# Altium footprint library WE-HCFT.PcbLib: 62 footprints (part 2 of 4)
Each footprint in its own frame and in the unit in brackets; x right, y up, seen from the top. Pads: shape width x height; smd on the part's side, far side on the other; paste and mask are expansions set on the pad; w line width, h text height; cw(c..) or ccw(c..) is an arc to the next point about the centre after c.
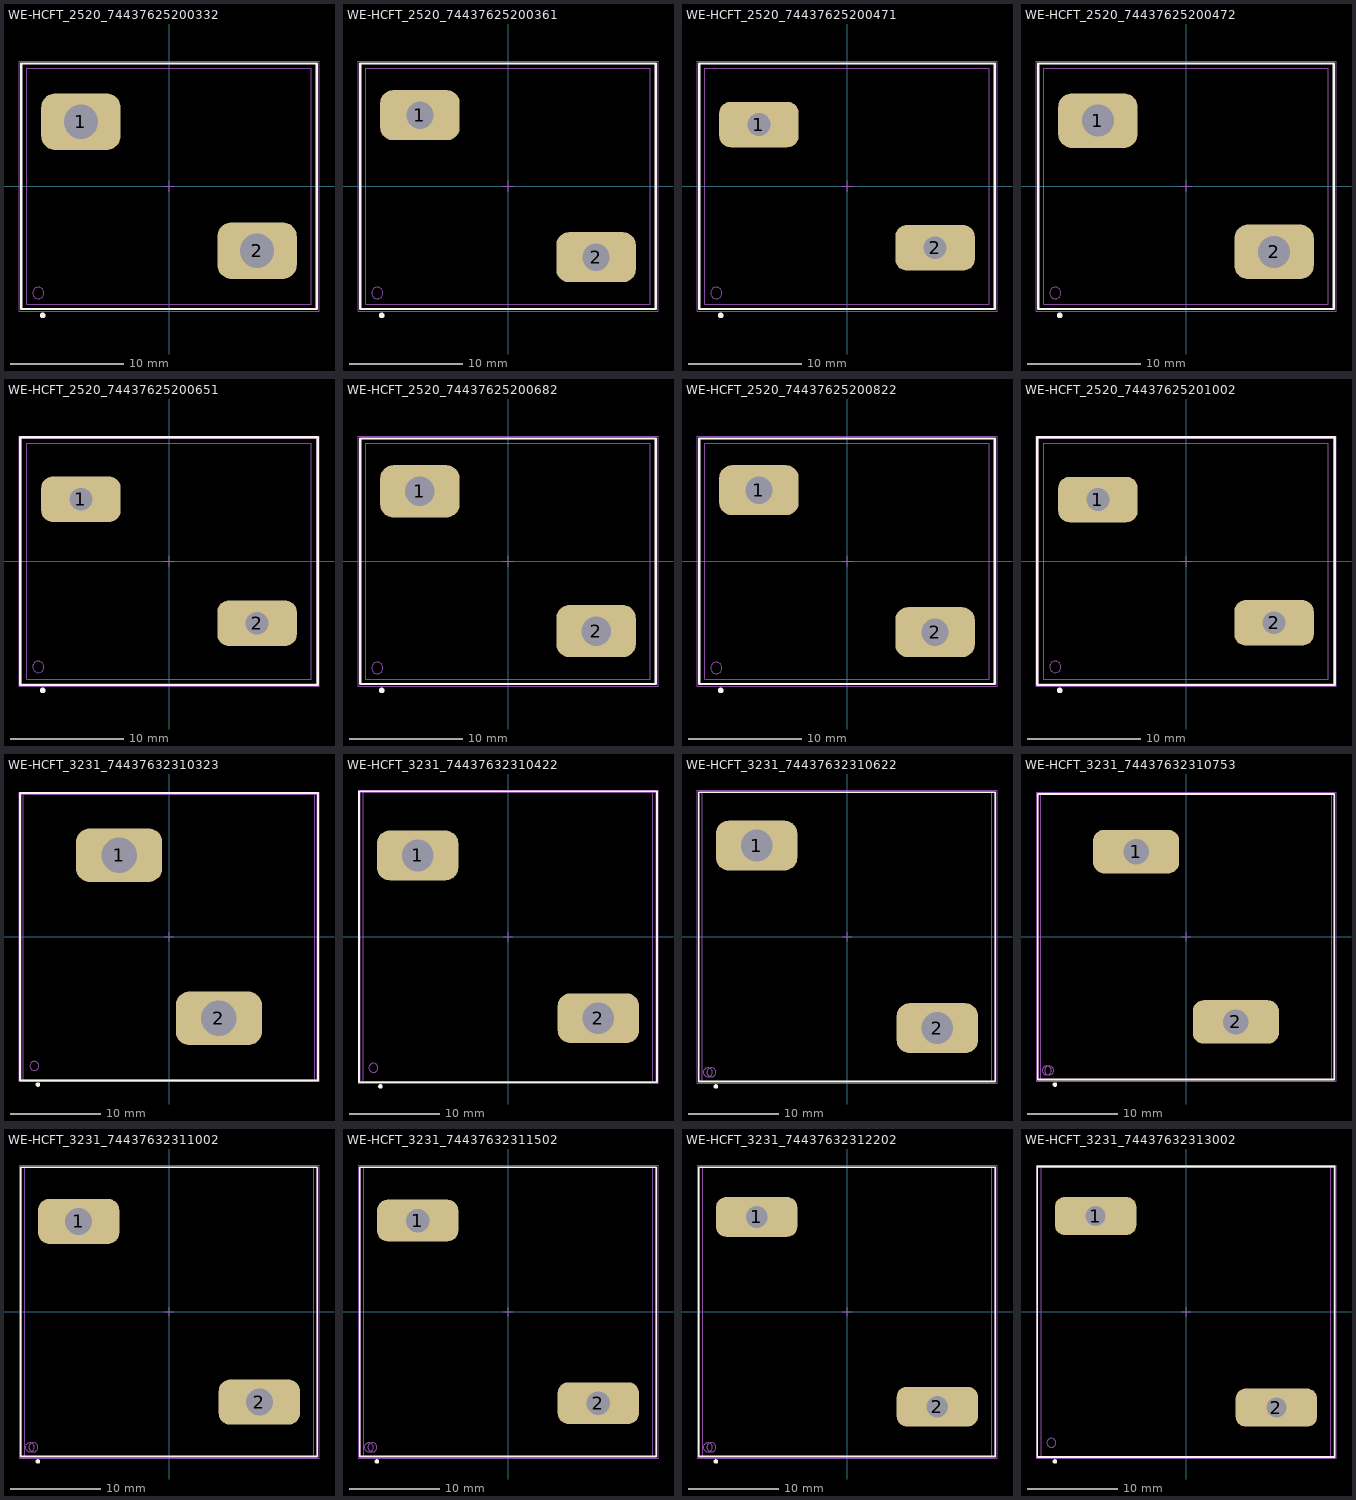
[diagram p1: the footprints below, top view; thin cyan lines are the x and y axes]

## WE-HCFT_2520_74437625200332 [mm] "THT High Current Inductor, body 25.00 x 20.80 mm"
height 21.75
pads (2):
  rrect50% 7x5 hole 3 square: 1(-7.75,5.675) 2(7.75,-5.675)
Top Overlay:
  circle w0.25: c-11.114,-11.364 r0.125
  lines w0.2: -13,-10.8 -13,10.8 13,10.8 13,-10.8 -13,-10.8
Top Assembly:
  circle w0.1: c-11.5,-9.4 r0.5
  lines w0.1: -13,-10.8 -13,10.8 13,10.8 13,-10.8 -13,-10.8
Top Designator:
  text ".Designator" at -3.647,-0.357 h1
Top 3D Body:
  circle w0.1: c-11.5,-9.4 r0.5
  lines w0.1: -12.5,-10.4 -12.5,10.4 12.5,10.4 12.5,-10.4 -12.5,-10.4
Top Courtyard:
  lines w0.05: -13.2,-11 -13.2,11 13.2,11 13.2,-11 -13.2,-11
Top Component Center:
  lines w0.1: -0.5,0 0.5,0 ; 0,-0.5 0,0.5
3D body "74437625200332.stp": height 21.9, standoff -3.85, extent -12.5,-10.4 12.5,10.4

## WE-HCFT_2520_74437625200361 [mm] "THT High Current Inductor, body 25.00 x 20.80 mm"
height 21.75
pads (2):
  rrect50% 7x4.4 hole 2.4 square: 1(-7.75,6.25) 2(7.75,-6.25)
Top Overlay:
  circle w0.25: c-11.114,-11.364 r0.125
  lines w0.2: -13,-10.8 13,-10.8 13,10.8 -13,10.8 -13,-10.8
Top Assembly:
  circle w0.1: c-11.5,-9.4 r0.5
  lines w0.1: -13,-10.8 13,-10.8 13,10.8 -13,10.8 -13,-10.8
Top Designator:
  text ".Designator" at -3.647,-0.357 h1
Top 3D Body:
  circle w0.1: c-11.5,-9.4 r0.5
  lines w0.1: -12.5,-10.4 12.5,-10.4 12.5,10.4 -12.5,10.4 -12.5,-10.4
Top Courtyard:
  lines w0.05: -13.2,-11 13.2,-11 13.2,11 -13.2,11 -13.2,-11
Top Component Center:
  lines w0.1: -0.5,0 0.5,0 ; 0,-0.5 0,0.5
3D body "74437625200361.stp": height 21.9, standoff -3.85, extent -12.5,-10.4 12.5,10.4

## WE-HCFT_2520_74437625200471 [mm] "THT High Current Inductor, body 25.00 x 20.80 mm"
height 21.75
pads (2):
  rrect50% 7x4 hole 2 square: 1(-7.75,5.425) 2(7.75,-5.425)
Top Overlay:
  circle w0.25: c-11.114,-11.364 r0.125
  lines w0.2: -13,-10.8 -13,10.8 13,10.8 13,-10.8 -13,-10.8
Top Assembly:
  circle w0.1: c-11.5,-9.4 r0.5
  lines w0.1: -13,-10.8 -13,10.8 13,10.8 13,-10.8 -13,-10.8
Top Designator:
  text ".Designator" at -3.647,-0.357 h1
Top 3D Body:
  circle w0.1: c-11.5,-9.4 r0.5
  lines w0.1: -12.5,-10.4 -12.5,10.4 12.5,10.4 12.5,-10.4 -12.5,-10.4
Top Courtyard:
  lines w0.05: -13.2,-11 -13.2,11 13.2,11 13.2,-11 -13.2,-11
Top Component Center:
  lines w0.1: -0.5,0 0.5,0 ; 0,-0.5 0,0.5
3D body "74437625200471.stp": height 21.9, standoff -3.85, extent -12.5,-10.4 12.5,10.4

## WE-HCFT_2520_74437625200472 [mm] "THT High Current Inductor, body 25.00 x 20.80 mm"
height 21.75
pads (2):
  rrect50% 7x4.8 hole 2.8 square: 1(-7.75,5.775) 2(7.75,-5.775)
Top Overlay:
  circle w0.25: c-11.114,-11.364 r0.125
  lines w0.2: -13,-10.8 13,-10.8 13,10.8 -13,10.8 -13,-10.8
Top Assembly:
  circle w0.1: c-11.5,-9.4 r0.5
  lines w0.1: -13,-10.8 13,-10.8 13,10.8 -13,10.8 -13,-10.8
Top Designator:
  text ".Designator" at -3.647,-0.357 h1
Top 3D Body:
  circle w0.1: c-11.5,-9.4 r0.5
  lines w0.1: -12.5,-10.4 12.5,-10.4 12.5,10.4 -12.5,10.4 -12.5,-10.4
Top Courtyard:
  lines w0.05: -13.2,-11 13.2,-11 13.2,11 -13.2,11 -13.2,-11
Top Component Center:
  lines w0.1: -0.5,0 0.5,0 ; 0,-0.5 0,0.5
3D body "74437625200472.stp": height 21.9, standoff -3.85, extent -12.5,-10.4 12.5,10.4

## WE-HCFT_2520_74437625200651 [mm] "THT High Current Inductor, body 25.00 x 20.80 mm"
height 21.75
pads (2):
  rrect50% 7x4 hole 2 square: 1(-7.75,5.45) 2(7.75,-5.45)
Top Overlay:
  circle w0.25: c-11.114,-11.364 r0.125
  lines w0.2: -13.1,-10.9 -13.1,10.9 13.1,10.9 13.1,-10.9 -13.1,-10.9
Top Assembly:
  circle w0.1: c-11.5,-9.3 r0.5
  lines w0.1: -13,-10.8 -13,10.8 13,10.8 13,-10.8 -13,-10.8
Top Designator:
  text ".Designator" at -3.647,-0.357 h1
Top 3D Body:
  lines w0.1: -12.5,-10.4 12.5,-10.4 12.5,10.4 -12.5,10.4 -12.5,-10.4
Top Courtyard:
  lines w0.05: -13.2,-11 13.2,-11 13.2,11 -13.2,11 -13.2,-11
Top Component Center:
  lines w0.1: -0.5,0 0.5,0 ; 0,-0.5 0,0.5
3D body "74437625200651.stp": height 21.9, standoff -3.85, extent -12.5,-10.4 12.5,10.4

## WE-HCFT_2520_74437625200682 [mm] "THT High Current Inductor, body 25.00 x 20.80 mm"
height 21.75
pads (2):
  rrect50% 7x4.6 hole 2.6 square: 1(-7.75,6.15) 2(7.75,-6.15)
Top Overlay:
  circle w0.25: c-11.114,-11.364 r0.125
  lines w0.2: -13,-10.8 13,-10.8 13,10.8 -13,10.8 -13,-10.8
Top Assembly:
  circle w0.1: c-11.5,-9.4 r0.5
  lines w0.1: -13,-10.8 13,-10.8 13,10.8 -13,10.8 -13,-10.8
Top Designator:
  text ".Designator" at -3.647,-0.357 h1
Top 3D Body:
  circle w0.1: c-11.5,-9.4 r0.5
  lines w0.1: -12.5,-10.4 12.5,-10.4 12.5,10.4 -12.5,10.4 -12.5,-10.4
Top Courtyard:
  lines w0.05: -13.2,-11 13.2,-11 13.2,11 -13.2,11 -13.2,-11
Top Component Center:
  lines w0.1: -0.5,0 0.5,0 ; 0,-0.5 0,0.5
3D body "74437625200682.stp": height 21.9, standoff -3.85, extent -12.5,-10.4 12.5,10.4

## WE-HCFT_2520_74437625200822 [mm] "THT High Current Inductor, body 25.00 x 20.80 mm"
height 21.75
pads (2):
  rrect50% 7x4.4 hole 2.4 square: 1(-7.75,6.25) 2(7.75,-6.25)
Top Overlay:
  circle w0.25: c-11.114,-11.364 r0.125
  lines w0.2: -13,-10.8 -13,10.8 13,10.8 13,-10.8 -13,-10.8
Top Assembly:
  circle w0.1: c-11.5,-9.4 r0.5
  lines w0.1: -13,-10.8 -13,10.8 13,10.8 13,-10.8 -13,-10.8
Top Designator:
  text ".Designator" at -3.647,-0.357 h1
Top 3D Body:
  circle w0.1: c-11.5,-9.4 r0.5
  lines w0.1: -12.5,-10.4 -12.5,10.4 12.5,10.4 12.5,-10.4 -12.5,-10.4
Top Courtyard:
  lines w0.05: -13.2,-11 -13.2,11 13.2,11 13.2,-11 -13.2,-11
Top Component Center:
  lines w0.1: -0.5,0 0.5,0 ; 0,-0.5 0,0.5
3D body "74437625200822.stp": height 21.9, standoff -3.85, extent -12.5,-10.4 12.5,10.4

## WE-HCFT_2520_74437625201002 [mm] "THT High Current Inductor, body 25.00 x 20.80 mm"
height 21.75
pads (2):
  rrect50% 7x4 hole 2 square: 1(-7.75,5.425) 2(7.75,-5.425)
Top Overlay:
  circle w0.25: c-11.114,-11.364 r0.125
  lines w0.2: -13.1,-10.9 13.1,-10.9 13.1,10.9 -13.1,10.9 -13.1,-10.9
Top Assembly:
  circle w0.1: c-11.5,-9.3 r0.5
  lines w0.1: -13,-10.8 13,-10.8 13,10.8 -13,10.8 -13,-10.8
Top Designator:
  text ".Designator" at -3.647,-0.357 h1
Top 3D Body:
  lines w0.1: -12.5,-10.4 -12.5,10.4 12.5,10.4 12.5,-10.4 -12.5,-10.4
Top Courtyard:
  lines w0.05: -13.2,-11 -13.2,11 13.2,11 13.2,-11 -13.2,-11
Top Component Center:
  lines w0.1: -0.5,0 0.5,0 ; 0,-0.5 0,0.5
3D body "74437625201002.stp": height 21.9, standoff -3.85, extent -12.5,-10.4 12.5,10.4

## WE-HCFT_3231_74437632310323 [mm] "THT High Current Inductor, body 32.20 x 31.50 mm"
height 30.5
pads (2):
  rrect50% 9.5x5.9 hole 3.9 square: 1(-5.5,9) 2(5.5,-9)
Top Overlay:
  circle w0.25: c-14.464,-16.313 r0.125
  lines w0.2: -16.45,-15.85 16.45,-15.85 16.45,15.85 -16.45,15.85 -16.45,-15.85
Top Assembly:
  circle w0.1: c-14.85,-14.25 r0.5
  lines w0.1: -16.35,-15.75 16.35,-15.75 16.35,15.75 -16.35,15.75 -16.35,-15.75
Top Designator:
  text ".Designator" at -3.647,-0.357 h1
Top 3D Body:
  lines w0.1: -16.1,-15.75 -16.1,15.75 16.1,15.75 16.1,-15.75 -16.1,-15.75
Top Courtyard:
  lines w0.05: -16.55,-15.95 -16.55,15.95 16.55,15.95 16.55,-15.95 -16.55,-15.95
Top Component Center:
  lines w0.1: -0.5,0 0.5,0 ; 0,-0.5 0,0.5
3D body "74437632310323.stp": height 29.6, standoff -3.9, extent -16.1,-15.5 16.1,15.5

## WE-HCFT_3231_74437632310422 [mm] "THT High Current Inductor, body 32.00 x 32.00 mm"
height 30
pads (2):
  rrect50% 9x5.5 hole 3.5 square: 1(-10,9) 2(10,-9)
Top Overlay:
  circle w0.25: c-14.114,-16.564 r0.125
  lines w0.2: -16.5,-16.1 -16.5,16.1 16.5,16.1 16.5,-16.1 -16.5,-16.1
Top Assembly:
  circle w0.1: c-14.9,-14.5 r0.5
  lines w0.1: -16.4,-16 -16.4,16 16.4,16 16.4,-16 -16.4,-16
Top Designator:
  text ".Designator" at -3.647,-0.357 h1
Top 3D Body:
  lines w0.1: -16,-16 -16,16 16,16 16,-16 -16,-16
Top Courtyard:
  lines w0.05: -16.6,-16.2 16.6,-16.2 16.6,16.2 -16.6,16.2 -16.6,-16.2
Top Component Center:
  lines w0.1: -0.5,0 0.5,0 ; 0,-0.5 0,0.5
3D body "74437632310422.stp": height 29.15, standoff -3.85, extent -16,-15.6 16,15.6

## WE-HCFT_3231_74437632310622 [mm] "THT High Current Inductor, body 32.00 x 32.00 mm"
height 30
pads (2):
  rrect50% 9x5.5 hole 3.5 square: 1(-10,10.1) 2(10,-10.1)
Top Overlay:
  circle w0.25: c-14.514,-16.564 r0.125
  lines w0.2: -16.4,-16 16.4,-16 16.4,16 -16.4,16 -16.4,-16
Top Assembly:
  circle w0.1: c-15.4,-15 r0.5
  lines w0.1: -16.4,-16 16.4,-16 16.4,16 -16.4,16 -16.4,-16
Top Designator:
  text ".Designator" at -3.647,-0.357 h1
Top 3D Body:
  circle w0.1: c-15,-15 r0.5
  lines w0.1: -16,-16 16,-16 16,16 -16,16 -16,-16
Top Courtyard:
  lines w0.05: -16.6,-16.2 16.6,-16.2 16.6,16.2 -16.6,16.2 -16.6,-16.2
Top Component Center:
  lines w0.1: -0.5,0 0.5,0 ; 0,-0.5 0,0.5
3D body "74437632310622.stp": height 29.05, standoff -3.95, extent -16,-15.6 16,15.6

## WE-HCFT_3231_74437632310753 [mm] "THT High Current Inductor, body 32.2 x 31.50 mm"
height 30.5
pads (2):
  rrect50% 9.5x4.8 hole 2.8 square: 1(-5.5,9.4) 2(5.5,-9.4)
Top Overlay:
  circle w0.25: c-14.464,-16.313 r0.125
  lines w0.2: -16.35,-15.75 -16.35,15.75 16.35,15.75 16.35,-15.75 -16.35,-15.75
Top Assembly:
  circle w0.1: c-15.35,-14.75 r0.5
  lines w0.1: -16.35,-15.75 -16.35,15.75 16.35,15.75 16.35,-15.75 -16.35,-15.75
Top Designator:
  text ".Designator" at -3.647,-0.357 h1
Top 3D Body:
  circle w0.1: c-15.1,-14.75 r0.5
  lines w0.1: -16.1,-15.75 -16.1,15.75 16.1,15.75 16.1,-15.75 -16.1,-15.75
Top Courtyard:
  lines w0.05: -16.55,-15.95 -16.55,15.95 16.55,15.95 16.55,-15.95 -16.55,-15.95
Top Component Center:
  lines w0.1: -0.5,0 0.5,0 ; 0,-0.5 0,0.5
3D body "74437632310753.stp": height 29.55, standoff -3.95, extent -16.1,-15.5 16.1,15.5

## WE-HCFT_3231_74437632311002 [mm] "THT High Current Inductor, body 32.00 x 32.00 mm"
height 30
pads (2):
  rrect50% 9x5 hole 3 square: 1(-10,10) 2(10,-10)
Top Overlay:
  circle w0.25: c-14.514,-16.564 r0.125
  lines w0.2: -16.4,-16 16.4,-16 16.4,16 -16.4,16 -16.4,-16
Top Assembly:
  circle w0.1: c-15.4,-15 r0.5
  lines w0.1: -16.4,-16 16.4,-16 16.4,16 -16.4,16 -16.4,-16
Top Designator:
  text ".Designator" at -3.647,-0.357 h1
Top 3D Body:
  circle w0.1: c-15,-15 r0.5
  lines w0.1: -16,-16 16,-16 16,16 -16,16 -16,-16
Top Courtyard:
  lines w0.05: -16.6,-16.2 16.6,-16.2 16.6,16.2 -16.6,16.2 -16.6,-16.2
Top Component Center:
  lines w0.1: -0.5,0 0.5,0 ; 0,-0.5 0,0.5
3D body "74437632311002.stp": height 29.05, standoff -3.95, extent -16,-15.6 16,15.6

## WE-HCFT_3231_74437632311502 [mm] "THT High Current Inductor, body 32.00 x 32.00 mm"
height 30
pads (2):
  rrect50% 9x4.6 hole 2.6 square: 1(-10,10.1) 2(10,-10.1)
Top Overlay:
  circle w0.25: c-14.514,-16.564 r0.125
  lines w0.2: -16.4,-16 16.4,-16 16.4,16 -16.4,16 -16.4,-16
Top Assembly:
  circle w0.1: c-15.4,-15 r0.5
  lines w0.1: -16.4,-16 16.4,-16 16.4,16 -16.4,16 -16.4,-16
Top Designator:
  text ".Designator" at -3.647,-0.357 h1
Top 3D Body:
  circle w0.1: c-15,-15 r0.5
  lines w0.1: -16,-16 16,-16 16,16 -16,16 -16,-16
Top Courtyard:
  lines w0.05: -16.6,-16.2 16.6,-16.2 16.6,16.2 -16.6,16.2 -16.6,-16.2
Top Component Center:
  lines w0.1: -0.5,0 0.5,0 ; 0,-0.5 0,0.5
3D body "74437632311502.stp": height 29.05, standoff -3.95, extent -16,-15.6 16,15.6

## WE-HCFT_3231_74437632312202 [mm] "THT High Current Inductor, body 32.00 x 32.00 mm"
height 30
pads (2):
  rrect50% 9x4.4 hole 2.4 square: 1(-10,10.5) 2(10,-10.5)
Top Overlay:
  circle w0.25: c-14.514,-16.564 r0.125
  lines w0.2: -16.4,-16 -16.4,16 16.4,16 16.4,-16 -16.4,-16
Top Assembly:
  circle w0.1: c-15.4,-15 r0.5
  lines w0.1: -16.4,-16 -16.4,16 16.4,16 16.4,-16 -16.4,-16
Top Designator:
  text ".Designator" at -3.647,-0.357 h1
Top 3D Body:
  circle w0.1: c-15,-15 r0.5
  lines w0.1: -16,-16 -16,16 16,16 16,-16 -16,-16
Top Courtyard:
  lines w0.05: -16.6,-16.2 -16.6,16.2 16.6,16.2 16.6,-16.2 -16.6,-16.2
Top Component Center:
  lines w0.1: -0.5,0 0.5,0 ; 0,-0.5 0,0.5
3D body "74437632312202.stp": height 29.05, standoff -3.95, extent -16,-15.6 16,15.6

## WE-HCFT_3231_74437632313002 [mm] "THT High Current Inductor, body 32.00 x 32.00 mm"
height 30
pads (2):
  rrect50% 9x4.2 hole 2.2 square: 1(-10,10.6) 2(10,-10.6)
Top Overlay:
  circle w0.25: c-14.514,-16.564 r0.125
  lines w0.2: -16.464,-16.064 -16.464,16.064 16.464,16.064 16.464,-16.064 -16.464,-16.064
Top Assembly:
  circle w0.1: c-14.9,-14.5 r0.5
  lines w0.1: -16.4,-16 -16.4,16 16.4,16 16.4,-16 -16.4,-16
Top Designator:
  text ".Designator" at -3.647,-0.357 h1
Top 3D Body:
  lines w0.1: -16,-16 -16,16 16,16 16,-16 -16,-16
Top Courtyard:
  lines w0.05: -16.6,-16.2 16.6,-16.2 16.6,16.2 -16.6,16.2 -16.6,-16.2
Top Component Center:
  lines w0.1: -0.5,0 0.5,0 ; 0,-0.5 0,0.5
3D body "74437632313002.stp": height 29.05, standoff -3.95, extent -16,-15.6 16,15.6